# Altium footprint library CustomCase.PcbLib: 411 footprints (part 23 of 26)
Each footprint in its own frame and in the unit in brackets; x right, y up, seen from the top. Pads: shape width x height; smd on the part's side, far side on the other; paste and mask are expansions set on the pad; w line width, h text height; cw(c..) or ccw(c..) is an arc to the next point about the centre after c.
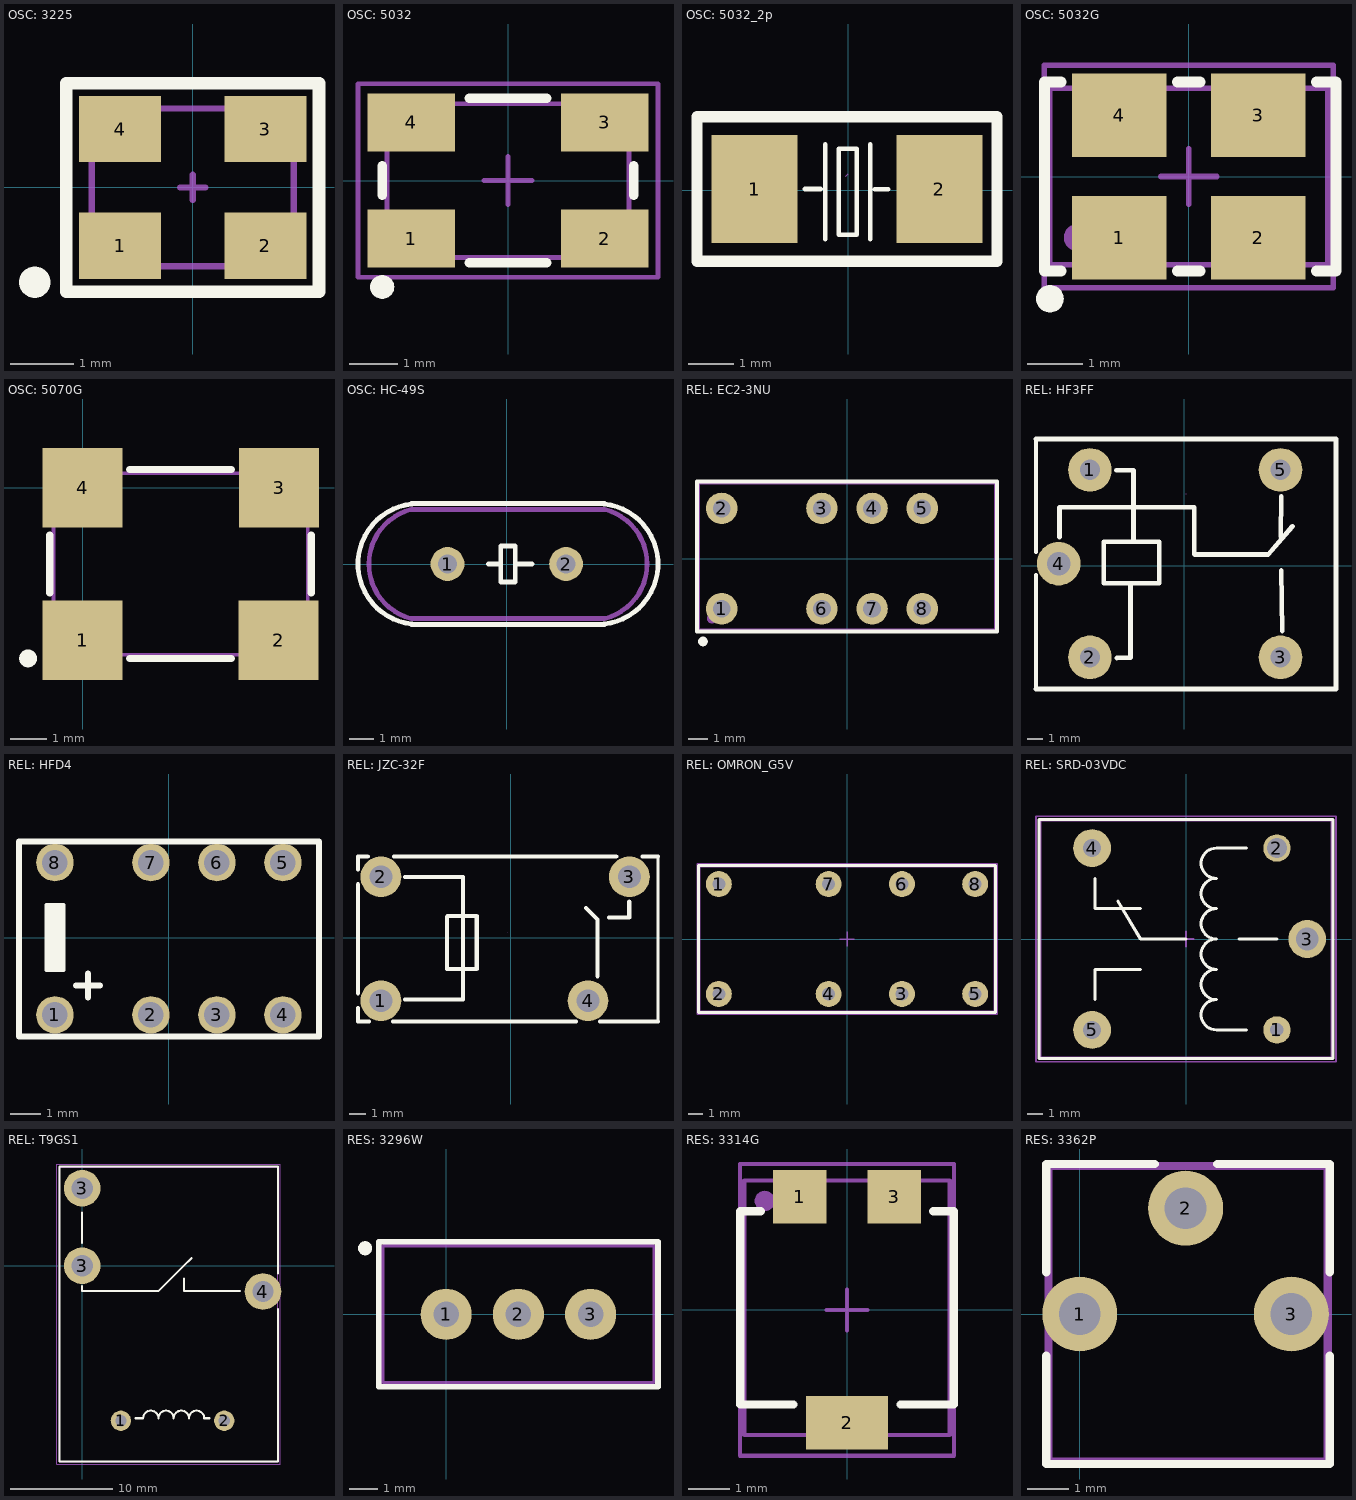
[diagram p22: the footprints below, top view; thin cyan lines are the x and y axes]

## OSC: 3225 [mm]
height 0.55
pads (5):
  rect 1.3x1.05 smd: 1(-1.15,-0.925) 2(1.15,-0.925) 3(1.15,0.925) 4(-1.15,0.925)
  round 0.5 on Top Overlay: ""(-2.5,-1.5)
Top Overlay:
  lines w0.2: -2,-1.65 2,-1.65 2,1.65 -2,1.65 -2,-1.65
Top Assy:
  lines w0.1: -1.6,-1.25 -1.6,1.25 1.6,1.25 1.6,-1.25 -1.6,-1.25
Size Area:
  lines w0.1: -0.2,0 0.2,0 ; 0,-0.2 0,0.2 ; -2,-1.7 -2,1.7 2,1.7 2,1.6 2,-1.7 -2,-1.7
3D body "User Library-User Library-Siward_SX3225.step": height 0.81, standoff 0, extent -1.6,-1.25 1.6,1.25

## OSC: 5032 [mm]
pads (6):
  rect 1.8x1.2 smd: 1(-2,-1.2) 2(2,-1.2) 3(2,1.2) 4(-2,1.2)
  round 0.5 on Top Overlay: ""(-2.6,-2.2)
  round 0.5 on Mech1: ""(-2,-1.1)
Top Overlay:
  lines w0.2: -2.6,-0.3 -2.6,0.3 ; -0.8,-1.7 0.8,-1.7 ; -0.8,1.7 0.8,1.7 ; 2.6,-0.3 2.6,0.3
Top Assy:
  lines w0.1: -2.5,-1.587 2.5,-1.587 2.5,1.587 -2.5,1.587 -2.5,-1.587
Size Area:
  lines w0.1: -0.5,0 0.5,0 ; 0,-0.5 0,0.5 ; -3.1,-2 3.1,-2 3.1,2 -3.1,2 -3.1,-2
3D body "ABM3B.STEP": height 1.1, standoff -0.01, extent -2.5,-1.587 2.5,1.587

## OSC: 5032_2p [mm]
pads (2):
  rect 1.9x2.4 smd: 1(-2.074,0.024) 2(2.026,0.024)
Top Overlay:
  lines w0.1: -0.964,0.024 -0.609,0.024 ; -0.507,-1.085 -0.507,1.015 ; 0.493,-1.085 0.493,1.015 ; 0.593,0.015 0.893,0.015 ; -0.207,-0.985 -0.207,0.914 0.193,0.914 0.193,-0.985 -0.207,-0.985
  lines w0.254: -3.349,-1.576 3.301,-1.576 3.301,-0.676 3.301,0.724 3.301,1.624 -3.349,1.624 -3.349,0.724 -3.349,-0.676 -3.349,-1.576
Size Area:
  lines w0.003: -0.05,0.31 0.001,0.361
3D body "Crystal_5032_2p.STEP": height 1.3, standoff 0, extent -2.503,-1.575 2.497,1.625

## OSC: 5032G [mm]
pads (6):
  rect 1.7x1.5 smd: 1(-1.25,-1.1) 2(1.25,-1.1) 3(1.25,1.1) 4(-1.25,1.1)
  round 0.5 on Top Overlay: ""(-2.5,-2.2)
  round 0.5 on Mech1: ""(-2,-1.1)
Top Overlay:
  lines w0.2: -2.3,-1.7 -2.6,-1.7 -2.6,1.7 -2.3,1.7 ; -0.2,-1.7 0.2,-1.7 ; -0.2,1.7 0.2,1.7 ; 2.3,-1.7 2.65,-1.7 2.65,1.7 2.3,1.7
Top Assy:
  lines w0.1: -2.5,-1.587 -2.5,1.587 2.5,1.587 2.5,-1.587 -2.5,-1.587
Size Area:
  lines w0.1: -0.5,0 0.5,0 ; 0,-0.5 0,0.5 ; -2.6,-2 -2.6,2 2.6,2 2.6,-2 -2.6,-2
3D body "User Library-ASFL1.STEP": height 1.38, standoff 0.06, extent -2.473,-1.6 2.527,1.6

## OSC: 5070G [mm]
pads (5):
  rect 2.2x2.2 smd: 1(0,-4.2) 2(5.4,-4.2) 3(5.41,0) 4(0,0)
  round 0.5 on Top Overlay: ""(-1.5,-4.7)
Top Overlay:
  lines w0.2: -0.9,-2.9 -0.9,-1.3 ; 1.3,-4.7 4.1,-4.7 ; 1.3,0.5 4.1,0.5 ; 6.3,-2.9 6.3,-1.3
Top Assy:
  lines w0.1: -0.8,-4.6 6.2,-4.6 6.2,0.4 -0.8,0.4 -0.8,-4.6
3D body "User Library-50 MHz.STEP": height 1.51, standoff -0.01, extent -0.8,-4.6 6.2,0.4

## OSC: HC-49S [mm]
pads (2):
  round 1.4 hole 0.8: 1(-2.45,0) 2(2.45,0)
Top Overlay:
  lines w0.2: -3.95,-2.5 4.05,-2.5 ; -3.95,2.5 4.05,2.5 ; -3.65,-2.5 cw(c-3.65,0) -3.65,2.5 ; -0.75,0 -0.25,0 ; 0.425,0 1.05,0 ; 3.75,-2.5 ccw(c3.75,0) 3.75,2.5 ; -0.25,-0.75 -0.25,0.75 0.35,0.75 0.35,-0.75 -0.25,-0.75
Top Assy:
  lines w0.2: -3.95,-2.26 cw(c-3.366,0) -3.95,2.26 ; -3.95,-2.25 4.05,-2.25 ; -3.95,2.25 4.05,2.25 ; 4.05,-2.26 ccw(c3.466,0) 4.05,2.26
3D body "HC49S.STEP": height 3.6, standoff -3, extent -5.44,-2.2 5.54,2.291

## REL: EC2-3NU [mm]
pads (10):
  round 1.6 hole 0.9: 1(-6.35,-2.54) 2(-6.35,2.54) 3(-1.27,2.54) 4(1.27,2.54) 5(3.81,2.54) 6(-1.27,-2.54) 7(1.27,-2.54) 8(3.81,-2.54)
  round 0.5 on Top Overlay: ""(-7.3,-4.2)
  round 0.5 on Mech1: ""(-6.85,-3.04)
Top Overlay:
  lines w0.2: -7.6,-3.7 7.6,-3.7 7.6,3.9 -7.6,3.9 -7.6,-3.7
Top Assy:
  lines w0.1: -7.5,-3.59 7.5,-3.59 7.5,3.81 -7.5,3.81 -7.5,-3.59
Size Area:
  lines w0.1: -7.55,-3.64 7.55,-3.64 7.55,3.86 -7.55,3.86 -7.55,-3.64
3D body "User Library-EC2-12.STEP": height 8.2, standoff -3.5, extent -7.5,-3.59 7.5,3.81

## REL: HF3FF [mil]
pads (5):
  round 110 hole 51.18: 1(-238.24,240.96) 2(-238.24,-231.44) 3(242.16,-231.44) 5(242.16,240.96)
  round 110 hole 59.06: 4(-316.94,4.76)
Top Overlay:
  lines w10: -374.09,-311.09 -374.09,-24.15 ; -374.09,33.66 -374.09,318.83
  lines w11.81: -374.09,-311.09 381.81,-311.09 381.81,318.83 -374.09,318.83 ; -314.95,70.9 -315.04,146.71 24.96,146.71 24.96,28.6 25.91,27.65 184.02,27.65 204.02,27.65 209.35,27.65 211.35,27.65 272,99 ; -172.04,240.19 -128.42,240.09 -128.42,60.09 -203.54,60.09 -203.54,-44.79 -63.54,-44.79 -63.54,60.09 -135.98,60.09 ; -170.47,-233.04 -135.98,-232.35 -135.98,-44.79 ; 242.55,72.7 243.71,174.83 ; 244.02,-12.35 246.07,-164.93
Size Area:
  lines w0.1: 3.85,180.48 3.87,180.5
3D body "6666.STEP": height 622.05, standoff -118.11, extent -379.11,-302.33 376.79,311.84

## REL: HFD4 [mm]
pads (8):
  round 1.25 hole 0.85: 1(-3.8,-2.58) 2(-0.6,-2.58) 3(1.6,-2.58) 4(3.8,-2.58) 5(3.8,2.5) 6(1.6,2.5) 7(-0.6,2.5) 8(-3.8,2.5)
Top Overlay:
  rectangle: -4.1,-1.1 -3.5,1.1
  lines w0.1: -4.1,-1.1 -3.5,-1.1 -3.5,1.1 -4.1,1.1 -4.1,-1.1
  lines w0.2: -3.1,-1.6 -2.3,-1.6 ; -2.7,-2 -2.7,-1.2 ; -5,-3.3 -5,3.2 5,3.2 5,-3.3 -5,-3.3
3D body: height 5.65, standoff 0, extent -5,-3.3 5,3.2

## REL: JZC-32F [mm]
pads (4):
  round 2.5 hole 1.4: 1(-7.97,-3.851) 2(-7.97,3.749) 3(7.27,3.749) 4(4.73,-3.851)
Top Overlay:
  lines w0.203: 9.02,4.859 9.02,4.869 9.02,4.989 ; 9.023,-5.131 9.023,4.869
  lines w0.254: -9.377,-4.308 -9.377,-5.131 -8.713,-5.131 ; -9.377,-3.393 -9.377,3.292 ; -9.377,4.206 -9.377,4.989 -8.779,4.989 ; -7.228,-5.131 3.987,-5.131 ; -7.162,4.989 6.461,4.989 ; -6.491,-3.781 -2.94,-3.781 -2.94,3.739 ; -6.489,3.739 -2.94,3.739 ; -3.92,1.299 -3.92,-1.901 -2.09,-1.901 -2.09,1.339 -3.881,1.339 ; -3.028,3.739 -2.94,3.739 ; 4.609,1.839 5.32,1.129 5.32,-2.351 ; 5.472,-5.131 9.023,-5.131 ; 6.009,1.259 7.26,1.259 7.26,2.219 ; 8.078,4.989 9.02,4.989
Size Area:
  lines w0.003: -0.201,0.303 -0.2,0.304
3D body "User Library-JZC-32F012-HS3(555).STEP": height 15.7, standoff -4, extent -9.378,-5.176 9.023,5.024

## REL: OMRON_G5V [mm] "Omron G5V relay"
height 10
pads (8):
  round 1.8 hole 0.9: 1(-8.89,3.81) 2(-8.89,-3.81) 3(3.81,-3.81) 4(-1.27,-3.81) 5(8.89,-3.81) 6(3.81,3.81) 7(-1.27,3.81) 8(8.89,3.81)
Top Overlay:
  lines w0.2: -10.3,-5.1 -10.3,5.1 10.3,5.1 10.3,-5.1 -10.3,-5.1
Top Assy:
  lines w0.1: -10.2,-5 10.2,-5 10.2,5 -10.2,5 -10.2,-5
Size Area:
  lines w0.1: -0.5,0 0.5,0 ; 0,-0.5 0,0.5 ; -10.4,-5.207 -10.4,5.207 10.4,5.207 10.4,-5.207 -10.4,-5.207
3D body "OMRON G5V-2.step": height 10.92, standoff -4, extent -10.2,-5 10.2,5

## REL: SRD-03VDC [mm]
pads (5):
  round 1.8 hole 0.9: 1(6,-6)
  round 1.8 hole 1.3: 2(6,6)
  round 2.5 hole 1.5: 3(8,0)
  round 2.5 hole 1.2: 4(-6.2,6) 5(-6.2,-6)
Top Overlay:
  lines w0.2: -6,-4 -6,-2 -3,-2 ; -6,4 -6,2 -3,2 ; -4.5,2.5 -3,0 0,0 ; 3.5,0 6,0 ; 4,-6 2,-6 cw(c2,-5) 2,-4 cw(c2,-3) 2,-2 cw(c2,-1) 2,0 cw(c2,1) 2,2 cw(c2,3) 2,4 cw(c2,5) 2,6 4,6 ; -9.7,-7.9 -9.7,7.9 9.7,7.9 9.7,-7.9 -9.7,-7.9
Top Assy:
  lines w0.1: -6,-4 -6,-2 -3,-2 ; -6,4 -6,2 -3,2 ; -4.5,2.5 -3,0 0,0 ; 3.5,0 6,0 ; 4,-6 2,-6 cw(c2,-5) 2,-4 cw(c2,-3) 2,-2 cw(c2,-1) 2,0 cw(c2,1) 2,2 cw(c2,3) 2,4 cw(c2,5) 2,6 4,6 ; -9.6,-7.8 9.6,-7.8 9.6,7.8 -9.6,7.8 -9.6,-7.8
Size Area:
  lines w0.1: -0.5,0 0.5,0 ; 0,-0.5 0,0.5 ; -9.9,-8.1 -9.9,8.1 9.9,8.1 9.9,-8.1 -9.9,-8.1
3D body "6666.STEP": height 15.8, standoff -3, extent -9.6,-7.8 9.6,7.8

## REL: T9GS1 [mm]
pads (5):
  round 2 hole 1.1: 1(3.81,-15.24) 2(13.97,-15.24)
  round 3.6 hole 2.1: 3(0,0) 3(0,7.62) 4(17.78,-2.54)
Top Overlay:
  lines w0.2: 0,-2 0,-2.5 7.5,-2.5 10,0 ; 0,2.25 0,5.25 ; 5.25,-15 6,-15 cw(c6.75,-15) 7.5,-15 cw(c8.25,-15) 9,-15 cw(c9.75,-15) 10.5,-15 cw(c11.25,-15) 12,-15 12.5,-15 ; 10,-1.25 10,-2.5 15.5,-2.5 ; 10.75,0.75 10,0 ; 19.25,-4.25 19.25,-19.25 -2.25,-19.25 -2.25,9.75 19.25,9.75 19.25,-0.75 ; 10,0 10,0
3D model:
  lines w0.1: -2.25,-19.3 -2.25,9.7 19.25,9.7 19.25,-19.3 -2.25,-19.3
Size Area:
  lines w0.1: -2.5,-19.5 19.5,-19.5 19.5,10 -2.5,10 -2.5,-19.5
3D body "T9GS1L14-12.STEP": height 15.7, standoff -3.5, extent -2.25,-19.3 19.25,9.7

## RES: 3296W [mm]
pads (4):
  round 1.8 hole 0.9: 1(0,0) 2(2.54,0) 3(5.08,0)
  round 0.5 on Top Overlay: ""(-2.85,2.325)
Top Overlay:
  lines w0.2: -2.375,-2.55 -2.375,2.55 7.45,2.55 7.45,-2.55 -2.375,-2.55
Top Assy:
  lines w0.1: -2.225,-2.4 -2.225,2.4 7.305,2.4 7.305,-2.4 -2.225,-2.4
Size Area:
  lines w0.1: -2.3,-2.5 7.4,-2.5 7.4,2.5 -2.3,2.5 -2.3,-2.5
3D body "User Library-3296W.STEP": height 11.55, standoff -1.6, extent -2.225,-2.4 7.305,2.4

## RES: 3314G [mm]
pads (4):
  rect 1.3x1.3 smd: 1(-1.15,2.75) 3(1.15,2.75)
  rect 2x1.3 smd: 2(0,-2.75)
  round 0.5 on Mech1: ""(-2,2.65)
Top Overlay:
  lines w0.2: -2.1,2.4 -2.6,2.4 -2.6,-2.3 -1.3,-2.3 ; 1.3,-2.3 2.6,-2.3 2.6,2.4 2.1,2.4
Top Assy:
  lines w0.1: -2.499,-3.049 2.5,-3.049 2.5,3.149 -2.499,3.149 -2.499,-3.049
Size Area:
  lines w0.1: -0.5,0 0.5,0 ; 0,-0.5 0,0.5 ; -2.6,-3.55 2.6,-3.55 2.6,3.55 -2.6,3.55 -2.6,-3.55
3D body "3314g-1-103e.stp": height 2.72, standoff -0.01, extent -2.499,-3.049 2.5,3.149

## RES: 3362P [mm]
pads (3):
  round 1.8 hole 1: 1(0,0) 2(2.54,2.54) 3(5.08,0)
Top Overlay:
  lines w0.2: -0.8,-1 -0.8,-3.6 6,-3.6 6,-1 ; -0.8,1 -0.8,3.6 1.8,3.6 ; 3.3,3.6 6,3.6 6,1
Top Assy:
  lines w0.1: -0.7,-3.49 5.9,-3.49 5.9,3.5 -0.7,3.5 -0.7,-3.49
Size Area:
  lines w0.1: -0.8,-3.6 6,-3.6 6,3.6 -0.8,3.6 -0.8,-3.6
3D body "User Library-R_3362P.STEP": height 4.5, standoff -3, extent -0.7,-3.49 5.9,3.5